# Altium footprint library Resistor$.PcbLib: 99 footprints (part 6 of 7)
Each footprint in its own frame and in the unit in brackets; x right, y up, seen from the top. Pads: shape width x height; smd on the part's side, far side on the other; paste and mask are expansions set on the pad; w line width, h text height; cw(c..) or ccw(c..) is an arc to the next point about the centre after c.
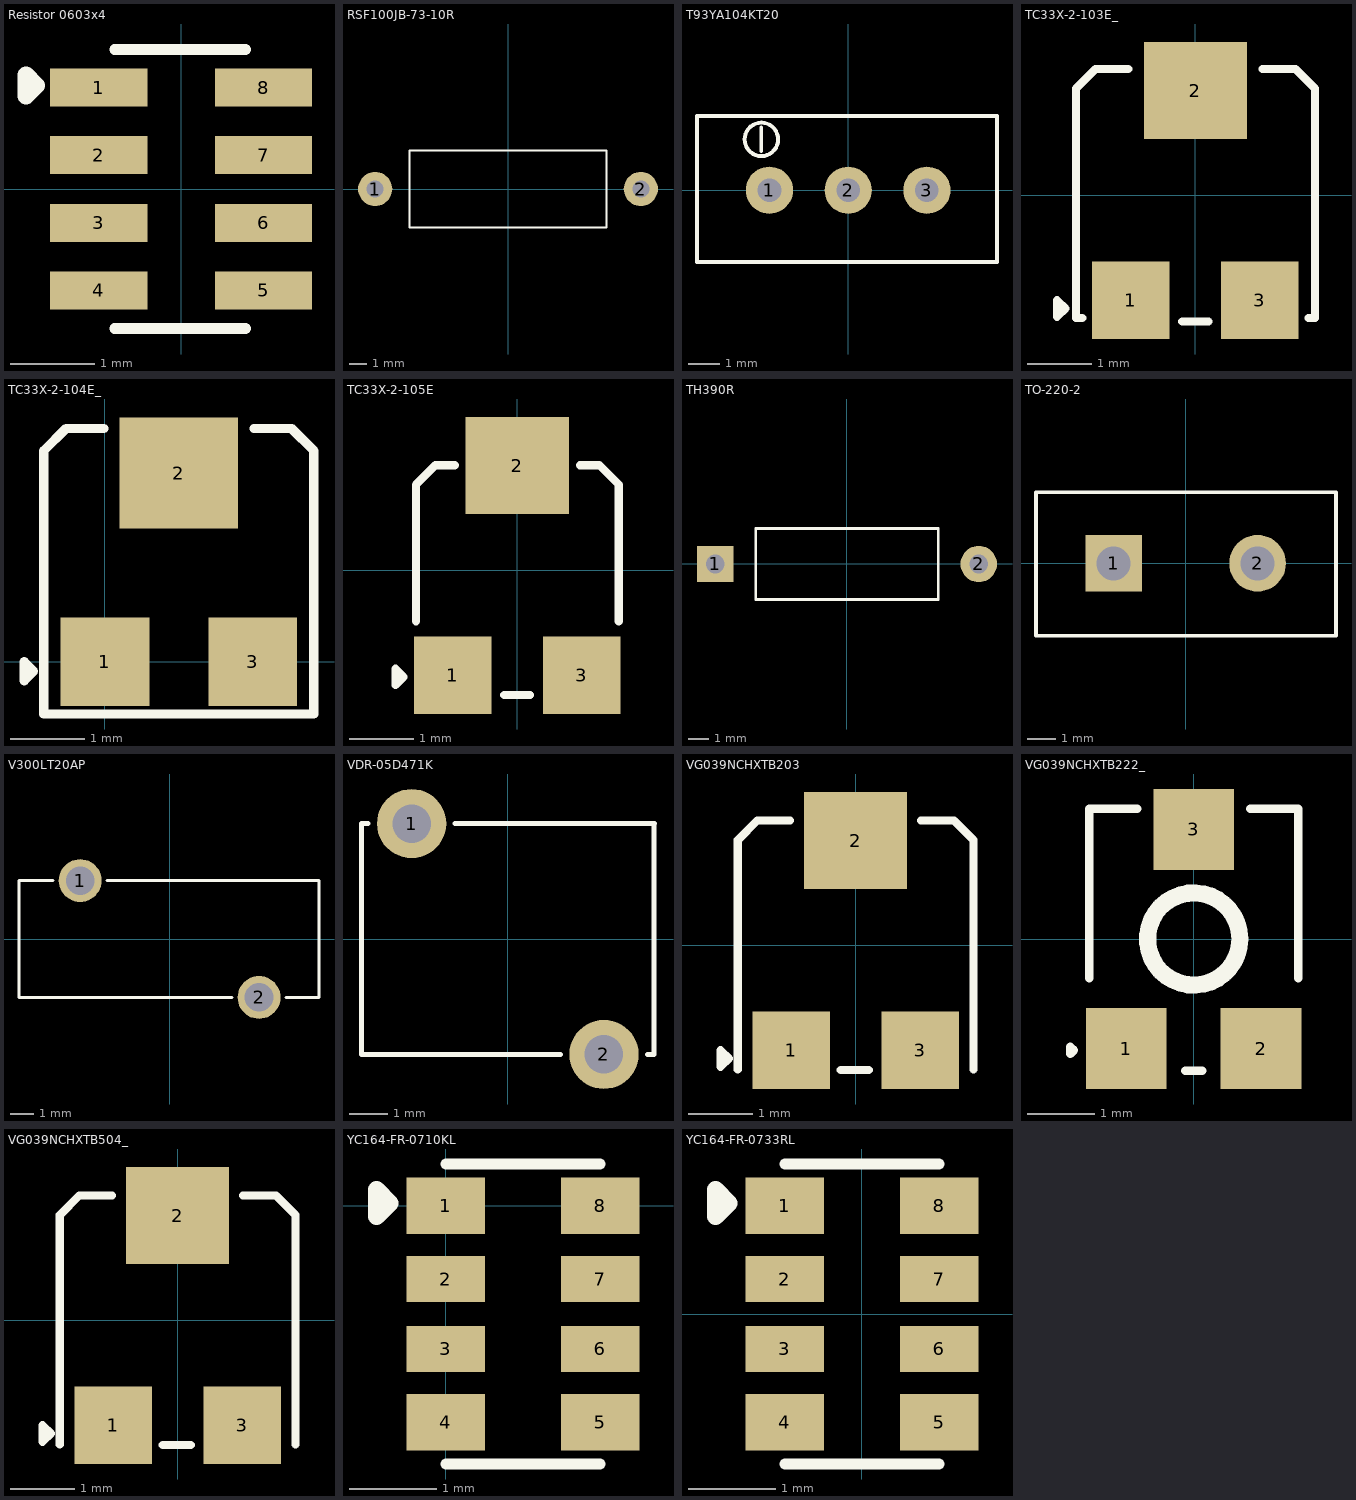
[diagram p5: the footprints below, top view; thin cyan lines are the x and y axes]

## Resistor 0603x4 [mm]
pads (8):
  rect 1.15x0.45 smd mask+0.055: 1(-0.975,1.2) 2(-0.975,0.4) 3(-0.975,-0.4) 4(-0.975,-1.2) 5(0.975,-1.2) 6(0.975,-0.4) 7(0.975,0.4) 8(0.975,1.2)
Top Overlay:
  lines w0.127: -0.787,-1.651 0.762,-1.651 ; -0.787,1.651 0.762,1.651
  lines w0.2: -1.839,1.098 -1.839,1.352 -1.712,1.225 -1.839,1.098
3D body "User Library-R-0603-Array-4-1.step": height 0.51, standoff -0.01, extent -0.8,-1.6 0.8,1.6

## RSF100JB-73-10R [mm]
pads (2):
  round 2 hole 1: 1(-7.75,0) 2(7.75,0)
Top Overlay:
  lines w0.127: -5.75,-2.25 5.75,-2.25 5.75,2.25 -5.75,2.25 -5.75,-2.25
3D body "RSF100JB-73-10R.STEP": height 4.5, standoff -5, extent -8.15,-2.238 8.15,2.238

## RV4NAYSD503A [mm]
pads (4):
  rrect50% 4.2x7 smd: 1(6.253,-20.044) 2(0.053,-20.542) 3(-6.147,-20.044)
  round 0 hole 1.2 square unplated: MH(13.513,-0.032)
Top Overlay:
  lines w0.254: 14.101,-2.264 cw(c0.053,-0.032) -14.172,-0.032 cw(c0.053,-0.032) 14.101,2.2
Mechanical 1:
  lines w0.013: -1266.363,5030.52 cw(c81.222,4404.066) -1266.311,5030.633 ; -1266.314,5030.626 cw(c-580.482,4711.732) -1266.287,5030.684 ; -249.835,-1280.249 cw(c2375.656,-2500.367) -249.684,-1279.923 ; -248.974,-1278.396 ccw(c-2012.317,-457.947) -248.836,-1278.1 ; 656.395,3604.051 ccw(c-3065.633,3659.853) 656.436,3606.88
3D body "RV4NAYSD503A.STEP": height 26.66, standoff -9.18, extent -14.171,-21.876 14.277,14.192

## T93YA104KT20 [mil]
pads (3):
  round 60 hole 30: 1(-100,0) 2(0,0) 3(100,0)
Top Overlay:
  lines w5: -110.39,49.52 -110.39,64.52 ; -110.39,85.72 ccw(c-110.19,64.51) -110.19,43.29 ccw(c-110.19,64.51) -109.99,85.72 ; -110.39,64.52 -110.39,79.52 -110.39,64.52 ; -192,-90.95 -192,93.98 189,93.98 189,-90.95 -192,-90.95
3D body "C7061693.step": height 433.07, standoff -196.85, extent -189.98,-89.5 187.98,92

## TC33X-2-103E_ [mm]
pads (3):
  rect 1.2x1.2 smd: 1(-1,-1.625) 3(1,-1.625)
  rect 1.6x1.5 smd: 2(0,1.625)
Top Overlay:
  lines w0.127: -1.753,-1.898 -1.851,-1.898 -1.851,1.659 -1.549,1.961 -1.041,1.961 ; -0.203,-1.956 0.203,-1.956 ; 1.041,1.961 1.549,1.961 1.851,1.659 1.851,-1.898 1.753,-1.898 ; -2.143,-1.879 -2.143,-1.625 -2.016,-1.752 -2.143,-1.879
3D body "TC-33X-2.stp": height 1.13, standoff -0.02, extent -1.8,-1.913 1.8,2.05

## TC33X-2-104E_ [mm]
pads (3):
  rect 1.2x1.2 smd: 1(0,0) 3(2,0)
  rect 1.6x1.5 smd: 2(1,2.55)
Top Overlay:
  lines w0.127: -0.016,3.155 -0.524,3.155 -0.826,2.853 -0.826,-0.705 2.826,-0.705 2.826,2.853 2.524,3.155 2.016,3.155 ; -1.092,-0.254 -1.092,0 -0.965,-0.127 -1.092,-0.254
3D body "TC-33X-2.stp": height 1.13, standoff -0.02, extent -0.76,-0.64 2.84,3.322

## TC33X-2-105E [mm]
pads (3):
  rect 1.2x1.2 smd: 1(-1,-1.625) 3(1,-1.625)
  rect 1.6x1.5 smd: 2(0,1.625)
Top Overlay:
  lines w0.127: -1.572,-0.787 -1.572,1.329 -1.27,1.631 -0.97,1.631 ; -0.203,-1.93 0.197,-1.93 ; 0.97,1.631 1.27,1.631 1.572,1.329 1.572,-0.787 ; -1.889,-1.777 -1.889,-1.523 -1.762,-1.65 -1.889,-1.777
3D body "TC33X-2-105E.step": height 1.2, standoff 0, extent -1.5,-1.9 1.5,1.9

## TH390R [mm]
pads (2):
  rect 1.8x1.8 hole 0.92: 1(-6.5,0)
  round 1.8 hole 0.92: 2(6.5,0)
Top Overlay:
  lines w0.127: -4.5,-1.75 4.5,-1.75 4.5,1.75 -4.5,1.75 -4.5,-1.75
3D body "fr12w-3905_-2t5200_asm_wpcb.stp": height 3.5, standoff -5, extent -6.75,-1.75 6.75,1.75

## TO-220-2 [mm]
pads (2):
  rect 2x2 hole 1.2 paste-2539.97 mask+0.051: 1(-2.54,0)
  round 2 hole 1.2 paste-2539.97 mask+0.051: 2(2.54,0)
Top Overlay:
  lines w0.127: -5.283,2.489 -5.283,-2.565 5.309,-2.565 5.309,2.489 ; -5.283,2.515 5.309,2.515
3D body "52338940 RTO 3D.stp": height 15.92, standoff -13.63, extent -5.25,-2.515 5.25,2.435

## V300LT20AP [mm]
pads (2):
  round 1.8 hole 1.2 paste-2539.97 mask+0.051: 1(-3.75,2.45) 2(3.75,-2.45)
Top Overlay:
  lines w0.127: -4.881,2.45 -6.314,2.45 -6.314,-2.45 2.619,-2.45 ; -2.619,2.45 6.263,2.45 6.263,-2.45 4.881,-2.45
3D body "V300.step": height 13.85, standoff -2.9, extent -6.25,-3.31 6.25,3.299

## VDR-05D471K [mm]
pads (2):
  round 1.8 hole 1 paste-2539.97 mask+0.051: 1(-2.5,3) 2(2.5,-3)
Top Overlay:
  lines w0.127: -3.631,3 -3.8,3 -3.8,-3 1.369,-3 ; -1.369,3 3.81,3 ; 3.631,-3 3.8,-3 3.8,3
3D body "C273543.step": height 9.09, standoff -3.15, extent -3.742,-3.496 3.742,3.496

## VG039NCHXTB203 [mm]
pads (3):
  rect 1.2x1.2 smd: 1(-1,-1.625) 3(1,-1.625)
  rect 1.6x1.5 smd: 2(0,1.625)
Top Overlay:
  lines w0.127: -1.826,-1.924 -1.826,1.634 -1.524,1.936 -1.016,1.936 ; -0.229,-1.93 0.203,-1.93 ; 1.016,1.936 1.524,1.936 1.826,1.634 1.826,-1.924 ; -2.092,-1.879 -2.092,-1.625 -1.965,-1.752 -2.092,-1.879
3D body "TC-33X-2.stp": height 1.13, standoff -0.02, extent -1.8,-1.913 1.8,2.05

## VG039NCHXTB222_ [mm]
pads (3):
  rect 1.2x1.2 smd: 1(-1,-1.625) 2(1,-1.625) 3(0,1.625)
Top Overlay:
  circle w0.254: c0,0 r0.684
  lines w0.127: -1.549,-0.584 -1.549,1.93 -0.838,1.93 ; -0.127,-1.956 0.127,-1.956 ; 0.838,1.93 1.549,1.93 1.549,-0.584 ; -1.829,-1.702 -1.829,-1.6 -1.778,-1.651 -1.829,-1.702
3D body "VG039NCHXTB222_C145162-3.STEP": height 1.1, standoff 0, extent -1.5,-1.925 1.5,1.875

## VG039NCHXTB504_ [mm]
pads (3):
  rect 1.2x1.2 smd: 1(-1,-1.625) 3(1,-1.625)
  rect 1.6x1.5 smd: 2(0,1.625)
Top Overlay:
  lines w0.127: -1.826,-1.924 -1.826,1.634 -1.524,1.936 -1.016,1.936 ; -0.229,-1.93 0.203,-1.93 ; 1.016,1.936 1.524,1.936 1.826,1.634 1.826,-1.924 ; -2.092,-1.879 -1.965,-1.752 -2.092,-1.625 -2.092,-1.879
3D body "TC-33X-2.stp": height 1.13, standoff -0.02, extent -1.8,-1.913 1.8,2.05

## YC164-FR-0710KL [mm]
pads (8):
  rect 0.9x0.65 smd: 1(0,0) 4(0,-2.48) 5(1.77,-2.48) 8(1.77,0)
  rect 0.9x0.53 smd: 2(0,-0.84) 3(0,-1.64) 6(1.77,-1.64) 7(1.77,-0.84)
Top Overlay:
  lines w0.127: 0.005,-2.958 1.765,-2.958 ; 0.005,0.478 1.765,0.478
  lines w0.2: -0.791,-0.122 -0.639,0.03 -0.791,0.182 -0.791,-0.122
3D body "YC164-JR-070RL.STEP": height 0.7, standoff 0, extent 0.085,-2.84 1.685,0.36

## YC164-FR-0733RL [mm]
pads (8):
  rect 0.9x0.65 smd: 1(-0.885,1.24) 4(-0.885,-1.24) 5(0.885,-1.24) 8(0.885,1.24)
  rect 0.9x0.53 smd: 2(-0.885,0.4) 3(-0.885,-0.4) 6(0.885,-0.4) 7(0.885,0.4)
Top Overlay:
  lines w0.127: -0.88,-1.718 0.88,-1.718 ; -0.88,1.718 0.88,1.718
  lines w0.2: -1.676,1.118 -1.676,1.422 -1.524,1.27 -1.676,1.118
3D body "YC164-JR-070RL.STEP": height 0.7, standoff 0, extent -0.8,-1.6 0.8,1.6